# Altium footprint library Amin-Library.PcbLib: 601 footprints (part 7 of 38)
Each footprint in its own frame and in the unit in brackets; x right, y up, seen from the top. Pads: shape width x height; smd on the part's side, far side on the other; paste and mask are expansions set on the pad; w line width, h text height; cw(c..) or ccw(c..) is an arc to the next point about the centre after c.
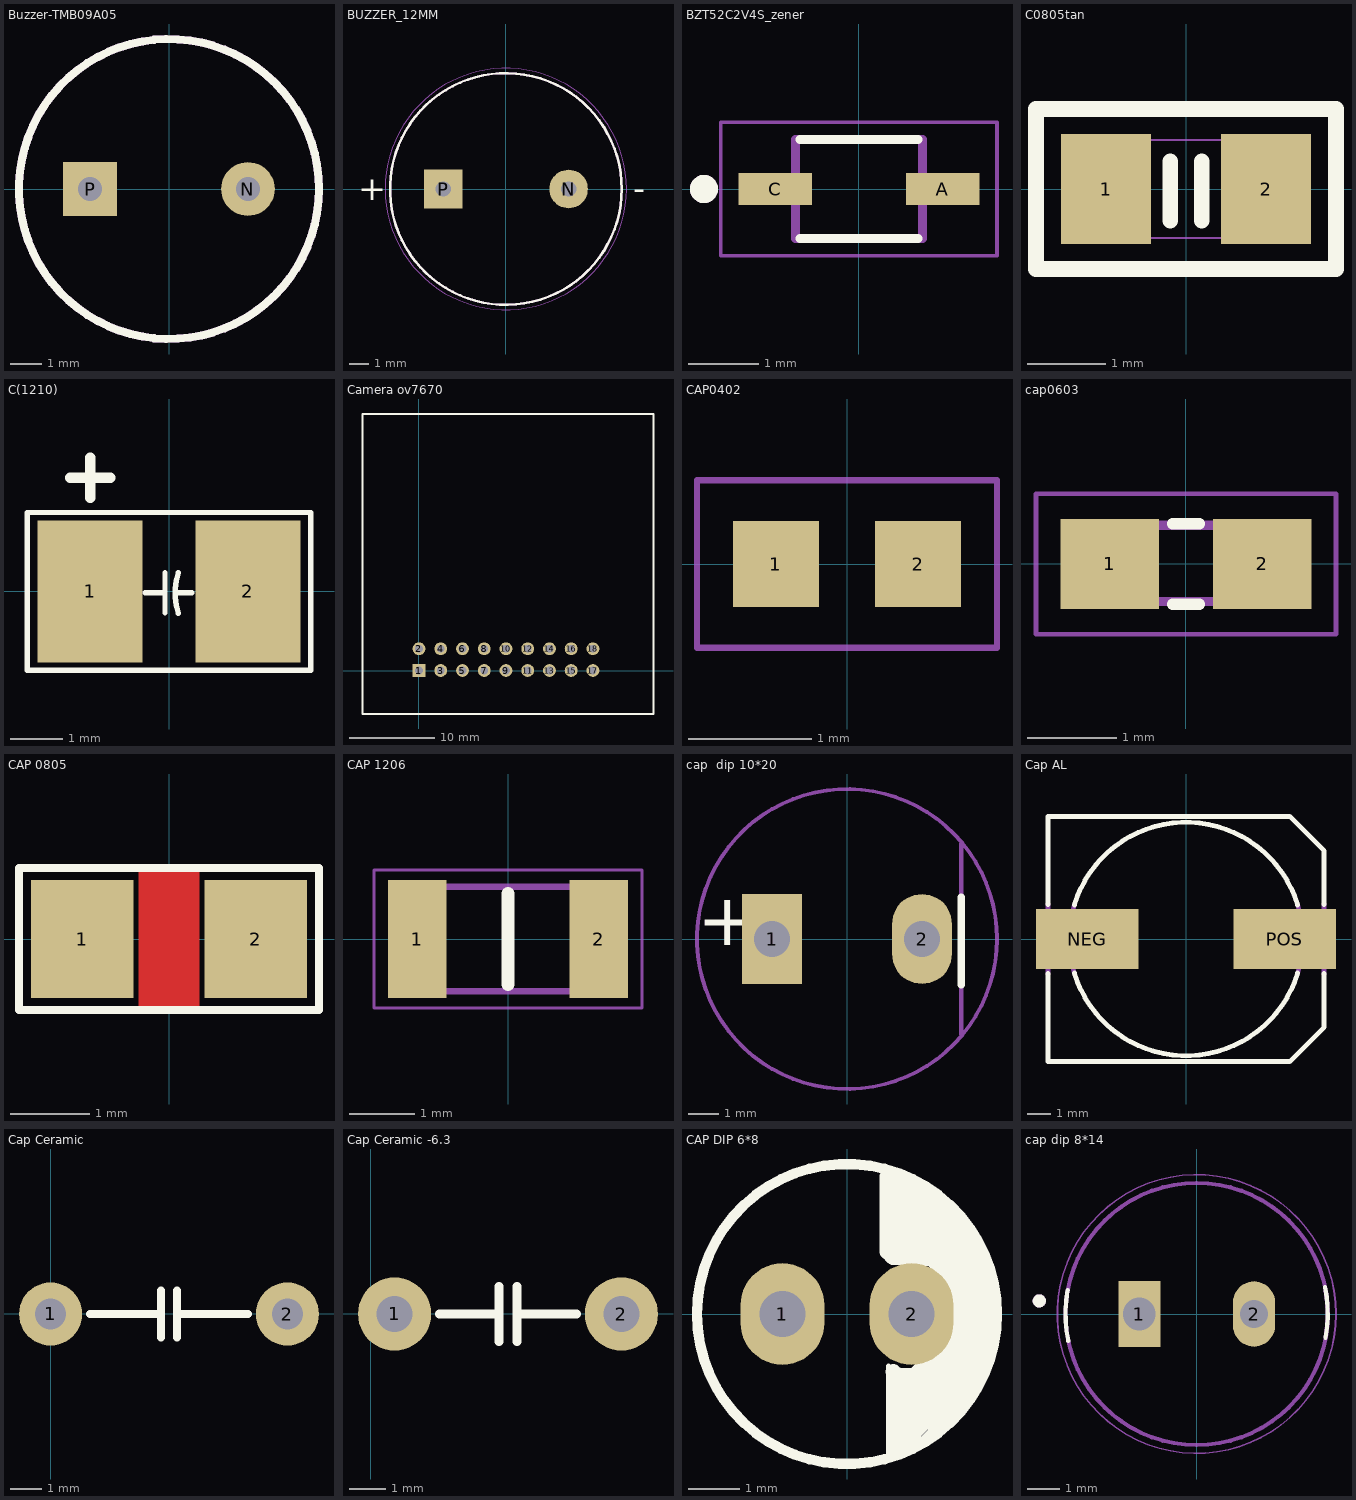
[diagram p6: the footprints below, top view; thin cyan lines are the x and y axes]

## Buzzer-TMB09A05 [mm] "Buzzer 9mm"
height 22
pads (2):
  round 1.7 hole 0.762: N(2.5,0)
  rect 1.7x1.7 hole 0.762: P(-2.5,0)
Top Overlay:
  circle w0.254: c0,0 r4.75
Top 3D Body:
  circle w0.254: c0,0 r4.75
3D body: height 0, standoff -3.6, extent 2.2,-0.3 2.8,0.3
3D body: height 0, standoff -3.6, extent -2.8,-0.3 -2.2,0.3
3D body: height 5, standoff 0, extent -4.75,-4.75 4.75,4.75

## BUZZER_12MM [mm]
pads (2):
  round 2 hole 0.8: N(3.25,0)
  rect 2x2 hole 0.8: P(-3.25,0)
Top Overlay:
  circle w0.127: c0,0 r6
  text "+" at -7.655,-0.571 h1.27
  text "-" at 6.608,-0.571 h1.27
Mechanical 13:
  circle w0.127: c0,0 r6
Mechanical 15:
  circle w0.05: c0,0 r6.25
3D body "step_temp.STEP": height 8.5, standoff -5.5, extent -6,-6 6,6

## BZT52C2V4S_zener [mm]
pads (2):
  rect 1.04x0.46 smd: A(1.19,0) C(-1.19,0)
Top Overlay:
  circle w0.2: c-2.2,0 r0.1
  lines w0.127: -0.84,-0.7 0.84,-0.7 ; -0.84,0.7 0.84,0.7
Mechanical 4:
  circle w0.2: c-2.2,0 r0.1
  circle w0.2: c-2.2,0 r0.1
  lines w0.127: -0.9,-0.7 0.9,-0.7 ; -0.9,-0.7 -0.9,0.7 ; -0.9,-0.7 0.9,-0.7 ; -0.9,-0.7 -0.9,0.7 ; -0.9,0.7 0.9,0.7 ; -0.9,0.7 0.9,0.7 ; 0.9,-0.7 0.9,0.7 ; 0.9,-0.7 0.9,0.7
Mechanical 16:
  lines w0.05: -1.96,-0.95 1.96,-0.95 1.96,0.95 -1.96,0.95 -1.96,-0.95

## C0805tan [mil]
height 104.33
pads (2):
  rect 45x55 smd: 1(-40,0) 2(40,0)
Top Overlay:
  lines w7.87: -7.87,-15.75 -7.87,13.78 ; 7.87,-15.75 7.87,13.78 ; -75,-40 75,-40 75,40 -75,40 -75,-40
Mechanical 8:
  lines w1: -39.37,-24.61 39.37,-24.61 39.37,24.61 -39.37,24.61 -39.37,-24.61

## C(1210) [mm]
pads (2):
  rect 2x2.7 smd: 1(-1.5,0) 2(1.5,0)
Top Overlay:
  lines w0.1: -0.457,-0.025 -0.076,-0.025 ; -0.076,-0.406 -0.076,0.356 ; 0.127,-0.025 0.432,-0.025 ; 0.178,-0.413 cw(c1.315,-0.029) 0.178,0.356 ; -2.692,-1.499 -2.692,1.499 2.692,1.499 2.692,-1.499 -2.692,-1.499
  lines w0.2: -1.88,2.159 -1.118,2.159 ; -1.499,1.778 -1.499,2.54
3D body "Tantalium 1210.STEP": height 2.03, standoff 0, extent -1.85,-1.465 1.85,1.465

## Camera ov7670 [mm] "Connector; Header; 13x2 Position"
pads (18):
  rect 1.5x1.5 hole 0.9: 1(0,0)
  round 1.5 hole 0.9: 2(0,2.54) 3(2.54,0) 4(2.54,2.54) 5(5.08,0) 6(5.08,2.54) 7(7.62,0) 8(7.62,2.54) 9(10.16,0) 10(10.16,2.54) 11(12.7,0) 12(12.7,2.54) 13(15.24,0) 14(15.24,2.54) 15(17.78,0) 16(17.78,2.54) 17(20.32,0) 18(20.32,2.54)
Top Overlay:
  lines w0.2: -6.604,-5.08 -6.604,29.972 27.405,29.972 27.405,-5.08 -6.604,-5.08
3D body "User Library-OV7670.step": height 29.91, standoff -6.99, extent -6.595,-5.136 27.405,29.864

## CAP0402 [mm]
pads (2):
  rect 0.7x0.7 smd: 1(-0.58,0) 2(0.58,0)
Mechanical 15:
  lines w0.051: -1.223,-0.683 1.223,-0.683 1.223,0.683 -1.223,0.683 -1.223,-0.683
3D body "User Library-Capacitor 0402.step": height 0.5, standoff 0, extent -0.5,-0.25 0.5,0.25

## cap0603 [mm]
pads (2):
  rect 1.1x1 smd: 1(-0.85,0) 2(0.85,0)
Top Overlay:
  lines w0.127: -0.15,-0.45 0.15,-0.45 ; -0.15,0.45 0.15,0.45
Mechanical 4:
  region: 0.331,0.48 0.83,0.48 0.83,-0.471 0.331,-0.471
  region: -0.839,0.48 -0.338,0.48 -0.338,-0.47 -0.839,-0.47
  region: 0.331,0.48 0.83,0.48 0.83,-0.471 0.331,-0.471
  region: -0.839,0.48 -0.338,0.48 -0.338,-0.47 -0.839,-0.47
  lines w0.102: -0.356,-0.419 0.356,-0.419 -0.356,-0.419 ; -0.356,0.432 0.356,0.432 -0.356,0.432
Mechanical 16:
  lines w0.051: -1.673,-0.783 -1.673,0.783 1.673,0.783 1.673,-0.783 -1.673,-0.783
3D body "cap 0603.STEP": height 0.82, standoff 0.01, extent -0.8,-0.45 0.8,0.45

## CAP 0805 [mil]
pads (2):
  rect 51x59 smd: 1(-43.31,0) 2(43.31,0)
Top Layer:
  pour cut-out: 15,35 15,-35 -15,-35 -15,35
Top Overlay:
  lines w3.94: -74.8,-35.43 -74.8,35.43 74.8,35.43 74.8,-35.43 -74.8,-35.43
3D body "SW3dPS-0805 SMD Capacitor.STEP": height 30.79, standoff 0, extent -39.38,-24.61 39.36,24.6

## CAP 1206 [mm]
pads (2):
  rect 0.9x1.82 smd: 1(-1.397,0) 2(1.397,0)
Top Overlay:
  lines w0.2: 0,-0.7 0,0.7
Mechanical 13:
  lines w0.1: -1.6,-0.8 -1.6,0.8 1.6,0.8 1.6,-0.8 -1.6,-0.8
Mechanical 15:
  lines w0.05: -2.06,-1.06 -2.06,1.06 2.06,1.06 2.06,-1.06 -2.06,-1.06
3D body "C3216C0G1H683J160AA.stp": height 1.8, standoff 0, extent -1.6,-0.8 1.6,0.8

## cap  dip 10*20 [mm]
pads (2):
  rect 2x3 hole 1.2: 1(-2.5,0)
  oval 2x3 hole 1.2: 2(2.5,0)
Top Overlay:
  lines w0.254: 3.81,-1.524 3.81,1.397
  text "+" at -4.998,-0.785 h3
Top Courtyard:
  circle w0.127: c0,0 r5
  circle w0.127: c0,0 r5
Mechanical 27:
  lines w0.15: 3.81,-3.175 3.81,3.175
3D body "User Library-Cap electrolitic radial 10x20.STEP": height 20.8, standoff -0.7, extent -4.998,-4.999 4.998,4.998

## Cap AL [mm]
pads (2):
  rect 4.3x2.5 smd: NEG(-4.15,0) POS(4.15,0)
Top Overlay:
  lines w0.203: -5.8,-1.45 -5.8,-5.15 4.35,-5.15 5.8,-3.7 5.8,-1.45 ; -5.8,1.45 -5.8,5.15 4.35,5.15 5.8,3.7 5.8,1.45 ; -4.69,-1.434 ccw(c0,0) 4.69,-1.434 ; -4.69,1.434 cw(c0,0) 4.69,1.434
Mechanical 4:
  lines w0.203: -5.8,-1.45 -5.8,1.45 -5.8,-1.45 ; -4.69,-1.434 cw(c0,0) -4.69,1.434 ccw(c0,0) -4.69,-1.434 ; 4.69,-1.434 ccw(c0,0) 4.69,1.434 cw(c0,0) 4.69,-1.434 ; 5.8,-1.45 5.8,1.45 5.8,-1.45
3D body "User Library-ALU-G.STEP": height 10.2, standoff 0, extent -5.8,-5.15 5.8,5.15

## Cap Ceramic [mil]
pads (2):
  round 80 hole 39.37: 1(0,0) 2(300,0)
Top Overlay:
  lines w10: 50,0 140,0 ; 140,-30 140,30 ; 160,-30 160,30 ; 160,0 250,0
3D body "User Library-D6_4x7_5.step": height 401.57, standoff -39.37, extent -11.42,-77.48 311.42,80

## Cap Ceramic -6.3 [mm]
pads (2):
  round 2.032 hole 1: 1(0.66,0) 2(6.96,0)
Top Overlay:
  lines w0.254: 1.905,0 3.556,0 ; 3.556,-0.762 3.556,0.762 ; 4.064,-0.762 4.064,0.762 ; 4.064,0 5.715,0
3D body "User Library-D6_4x7_5.step": height 10.2, standoff -1, extent -0.29,-1.968 7.91,2.032

## CAP DIP 6*8 [mm]
pads (2):
  oval 1.65x2 hole 0.9: 1(-1.27,0) 2(1.27,0)
Top Overlay:
  circle w0.2: c0,0 r2.95
  lines w0.1: 0.816,-1.024 0.816,-2.736 0.824,-2.728 0.888,-2.728 0.888,-1.256 0.896,-1.248 0.896,-1.336 0.944,-1.384 0.944,-2.712 1.056,-2.6 1.16,-2.6 1.248,-2.512 1.344,-2.512 1.4,-2.456 1.512,-2.456 1.736,-2.232 1.696,-2.232 1.576,-2.112 1.576,-2.064 1.64,-2.128 1.64,-2.296 1.384,-2.552 1.016,-2.552 1.016,-1.976 1.104,-2.064 1.104,-2.568 1.616,-2.056 1.616,-2.176 1.24,-2.552 1.216,-2.552 1.152,-2.488 1.152,-2.096 1.224,-2.168 1.224,-2.376 1.416,-2.184 1.448,-2.184 1.424,-2.16 1.232,-2.16 1.312,-2.24 1.32,-2.24 2.448,-1.112 2.448,-0.24 2.848,0.16 2.848,0.144 2.848,-0.016 2.784,0.048 2.784,1.016 2.36,1.44 2.36,1.656 1.832,2.184 1.832,2.136 2.152,1.816 2.152,1.768 1.824,2.096 1.8,2.096 1.24,2.656 1.064,2.656 1.032,2.688 0.976,2.688 0.976,2.408 0.952,2.384 0.952,2.664 1.04,2.576 1.192,2.576 1.216,2.6
  lines w0.3: 0.792,2.704 0.792,1.224 0.904,1.112 1.416,1.112 1.664,1.36 ; 0.912,-1.136 0.984,-1.208 1.504,-1.208 1.752,-1.456 1.752,-2.096 2.624,-1.224 2.624,-1.048 ; 0.944,-1.16 1.112,-1.328 ; 1.656,2.232 1.656,2.008 2.072,1.592
  lines w1: 1.284,2.108 1.24,2.064 1.24,1.544 1.336,1.448 1.8,1.448 2.344,0.904 2.344,-0.688 1.352,-1.68
3D body "User Library-Cap electrolitic radial 6x8.STEP": height 8.1, standoff -1.4, extent -2.999,-2.999 2.999,2.998

## cap dip 8*14 [mm]
pads (2):
  rect 1.28x2 hole 1: 1(-1.75,0)
  oval 1.28x2 hole 0.85: 2(1.75,0)
Top Overlay:
  circle w0.2: c-4.8,0.4 r0.1
  lines w0.127: -3.934,0.725 ccw(c0,0) -3.914,-0.824 ; 3.914,0.824 cw(c0,0) 3.934,-0.725
Top Courtyard:
  lines w0.127: 3.277,2.294 ccw(c0,0) 4,0
Mechanical 13:
  circle w0.2: c-4.8,0.4 r0.1
  circle w0.127: c0,0 r4
Mechanical 15:
  circle w0.05: c0,0 r4.25
3D body "User Library-Cap electrolitic radial 8x7.STEP": height 7.8, standoff -0.7, extent -3.998,-3.873 3.999,4.126